# Altium integrated library smoke_detector.IntLib: 17 symbols
Pins are listed as number, name and electrical type; pins without a type are passive.

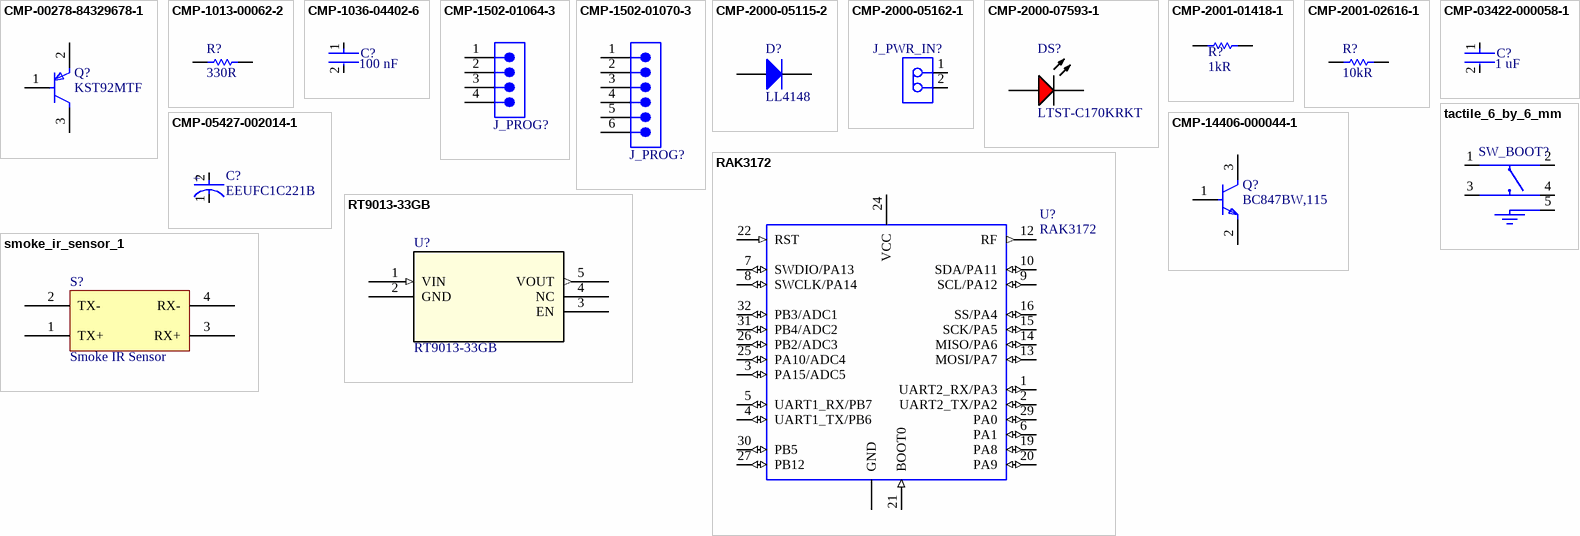
[diagram p0: symbols CMP-00278-84329678-1 to tactile_6_by_6_mm]

## CMP-00278-84329678-1
designator Q?, comment KST92MTF
KST92MTF Trans Gp Bjt PNP 300V 0.5A 250MW 3-PIN SOT-23 T/r / Trans PNP 300V 0.5A SOT23; Manufacturer Lifecycle Status: OBSOLETE; NexarPartId: 84329678; Max Collector Current: -500mA; hFE Min: 25; Power Dissipation: 350mW; Max Frequency: 50MHz; Current: 5A; Voltage: 200V; Collector Emitter Saturation Voltage: -500mV; Collector Emitter Voltage (VCEO): -300V; Emitter Base Voltage (VEBO): -5V; Element Configuration: Single; Max Junction Temperature (Tj): 150°C; Number of Elements: 1; Number of Pins: 3; Max Breakdown Voltage: 300V; Length: 2.9mm; Lead Free: Lead Free; RoHS: Compliant; Radiation Hardening: No; Current Rating: -500mA; Min Operating Temperature: -55°C; Max Operating Temperature: 150°C; Gain Bandwidth Product: 50MHz; Max Power Dissipation: 250mW; Width: 1.3mm; Schedule B: 8541210080; Mount: Surface Mount; Voltage Rating (DC): -300V; Collector Emitter Breakdown Voltage: -300V; Weight: 59.987591mg; REACH SVHC: No SVHC; Polarity: PNP; Lifecycle Status: Obsolete; Case/Package: SOT-23; Collector Base Voltage (VCBO): -300V; Frequency: 50MHz; Packaging: Cut Tape; Height: 1.2mm; Transition Frequency: 50MHz
footprint FP-318BM-MFG (Tape & Reel (TR) Surface Mount NPN SINGLE Bipolar (BJT) Transistor 40 @ 10mA 1V 200mA 225mW 500MHz)
footprint FP-318BM-IPC_A (Tape & Reel (TR) Surface Mount NPN SINGLE Bipolar (BJT) Transistor 40 @ 10mA 1V 200mA 225mW 500MHz)
footprint FP-318BM-IPC_B (Tape & Reel (TR) Surface Mount NPN SINGLE Bipolar (BJT) Transistor 40 @ 10mA 1V 200mA 225mW 500MHz)
footprint FP-318BM-IPC_C (Tape & Reel (TR) Surface Mount NPN SINGLE Bipolar (BJT) Transistor 40 @ 10mA 1V 200mA 225mW 500MHz)
pins: 1 B, 2 E, 3 C

## CMP-1013-00062-2
designator R?, comment value 330R  (hidden comment: ERJ-6GEYJ331V)
Manufacturer: Panasonic; Part Number: ERJ-6GEYJ331V
footprint RESC2013X70X40ML20T20 (Chip Resistor, 2-Leads, Body 2.00x1.25mm, IPC Low Density)
footprint RESC2013X70X40LL20T20 (Chip Resistor, 2-Leads, Body 2.00x1.25mm, IPC High Density)
footprint RESC2013X70X40NL20T20 (Chip Resistor, 2-Leads, Body 2.00x1.25mm, IPC Medium Density)
pins: 1, 2
1 alternate drawing of the same symbol

## CMP-1036-04402-6
designator C?, comment value 100 nF  (hidden comment: CC0805KRX7R7BB104)
CAP CER 0.1UF 16V X7R 0805; Manufacturer: Yageo; Material: Ceramic; Tolerance: 0.1; Manufacturer Part Number: CC0805KRX7R7BB104; Temperature: -30°C to +85°C; Lead Free: Yes; Footprint Url: http://www.yageo.com/exep/pages/download/literatures/UPY-C_GEN_24.pdf; Voltage Rating: 16 V; Package: CC0805-0.85; RoHS: TRUE; Digikey Description: CAP CER 0.1UF 16V X7R 0805; Category: Cap; Octopart: https://octopart.com/cc0805krx7r7bb104-yageo-39467769; Capacitance: 100 nF; Device Class L3: Ceramic Capacitors; ComponentLink2URL: http://www.yageo.com/documents/recent/UPY-GPHC_Y5V_6.3V-to-50V_8.pdf; Temperature Range Low: -30°C; Mouser Description: Multilayer Ceramic Capacitors MLCC - SMD/SMT 100nF 16V X7R 10%; Automotive: No; Device Class L2: Capacitors; Height: 0.95mm; ComponentLink2Description: Datasheet; Temperature Characteristic: X7R; Ipc Land Pattern Name: CAPC200125X85; Device Class L1: Passive Components; Temperature Range High: +85°C
footprint FP-CC0805-0_85-MFG
footprint FP-CC0805-0_85-IPC_C
footprint FP-CC0805-0_85-IPC_B
footprint FP-CC0805-0_85-IPC_A
pins: 1, 2

## CMP-1502-01064-3
designator J_PROG?, comment 61300411121  (value not drawn)
NexarPartId: 32855522; Operating Supply Voltage: 250V; Pitch: 2.54mm; Contact Resistance: 20mΩ; Number of Positions: 4; Current Rating: 3A; Connector Type: Male Pin; Gender: Male; Contact Plating: Gold; Height: 8.89mm; Lead Pitch: 2.54mm; Lead Free: Lead Free; Contact Mating Length: 5.9944mm; Number of Rows: 1; Termination: Solder; Packaging: Bulk; REACH SVHC: Unknown; Min Operating Temperature: -40°C; RoHS: Compliant; Number of Contacts: 4; Voltage Rating: 250V; Color: Black; Max Operating Temperature: 105°C; Contact Material: Copper; Mount: Through Hole; Orientation: Vertical; Number of Pins: 4
footprint 61300411121 (THT Vertical Pin Header WR-PHD, Pitch 2.54 mm, Single Row, 4 pins)
pins: 1, 2, 3, 4

## CMP-1502-01070-3
designator J_PROG?, comment 61300611121  (value not drawn)
NexarPartId: 20084590; Current Rating: 3A; Pitch: 2.54mm; Gender: Male; Operating Supply Voltage: 250V; Connector Type: Male Pin; Number of Positions: 6; Contact Resistance: 20mΩ; Packaging: Bulk; Number of Pins: 6; Number of Rows: 1; Contact Plating: Gold; Lead Free: Lead Free; RoHS: Compliant; Contact Mating Length: 5.9944mm; Voltage Rating: 250V; REACH SVHC: Unknown; Contact Gender: Male; Housing Material: PBT; Min Operating Temperature: -40°C; Lead Pitch: 2.54mm; Mount: Through Hole; Number of Contacts: 6; Max Operating Temperature: 105°C; Contact Material: Copper; Orientation: Vertical; Termination: Through Hole; Color: Black; Height: 8.89mm
footprint 61300611121 (THT Vertical Pin Header WR-PHD, Pitch 2.54 mm, Single Row, 6 pins)
pins: 1, 2, 3, 4, 5, 6

## CMP-2000-05115-2
designator D?, comment LL4148
Small Signal Diode, 100 V, 0.2 A, -55 to 175 degC, 2-Pin SOD80, RoHS, Tape and Reel; Manufacturer: Fairchild; Reverse Voltage-Max [Vrrm]: 100V; Average Forward Current-Max: 200mA; Forward Voltage: 1V; Reverse Recovery Time-Max: 1ns; Power Dissipation: 500mW; Datasheet URL: https://www.fairchildsemi.com/datasheets/LL/LL4148.pdf; Manufacturer URL: https://www.fairchildsemi.com/; Datasheet Version: Rev. 1.8, 01/2016
footprint FAIR-SOD80-2_V (SOD, 2-Leads, Body 3.45x1.4mm)
pins: 1 A, 2 K

## CMP-2000-05162-1
designator J_PWR_IN?, comment B2B-PH-K-S(LF)(SN)  (value not drawn)
Male Header, Pitch 2 mm, 1 x 2 Position, Height 6 mm, Tail Length 3.4 mm, -25 to 85 degC, RoHS, Bulk; Manufacturer: JST; Pitch: 2mm; Style/Orientation: StraightHeader/Plug; No of Positions: 2; Datasheet Version: Nov-08; Datasheet URL: http://datasheet.octopart.com/B2B-PH-K-S%28LF%29%28SN%29-JST-datasheet-8324864.pdf; Manufacturer URL: http://www.jst.com/home2.html; Type: ShroudedHeader; Termination: Crimp
footprint JST-B2B-PH-K-S_V (Connector, 2-Leads, Body 5.9x4.5mm, Pitch 2mm)
pins: 1, 2

## CMP-2000-07593-1
designator DS?, comment LTST-C170KRKT
LED Red, 75 mW, 54 mcd, -55 to 85 degC, 2-Pin SMD, RoHS, Tape and Reel; Manufacturer: Lite-On; Lens Transparency: Clear; Number of Elements: 1; Power Rating: 75mW; Luminous Intensity: 54mcd; Viewing Angle: 130degrees; Forward Current: 30mA; Wavelength: 639nm; Lens Style: Rectangular; Case\/Package: 0805; Test Current: 20mA; Dominant Wavelength: 631nm; Forward Voltage: 2V; Lens Colour: Colorless; Min Operating Temperature: -55degC; RoHSCompliant: True; Length: 3.2mm; Width: 1.25mm; Mount: SurfaceMount; Packaging: TapeandReel; Number of LEDs: 1; Radiation Hardening: No; Datasheet URL: http://optoelectronics.liteon.com/upload/download/DS-22-99-0150/LTST-C170KRKT.pdf; Datasheet Version: Rev. D, 11/2014; Case Code (Metric): 2012; Height: 1.1mm; Number of Pins: 2; Package Description: 2-Pin Surface Mount Device, Body 2 x 1.25 mm; Manufacturer URL: http://www.us.liteon.com/; Lead Free: LeadFree; Illumination Colour: Red; Colour: Red; Case Code (Imperial): 0805; Max Operating Temperature: 85degC; Power Dissipation: 75mW; Mounting Technology: SurfaceMount; Package Reference: C170KRKT; Package Quantity: 1; Depth: 1.6mm
footprint LTST-C170KRKT_V (SMD, 2-Leads, Body 2x1.25mm)
pins: 1 A, 2 K

## CMP-2001-01418-1
designator R?, comment value 1kR  (hidden comment: RC0805JR-131KL)
Manufacturer: Yageo; Part Number: RC0805JR-131KL
footprint RESC2013X60X35LL10T20 (Chip Resistor, 2-Leads, Body 2.00x1.25mm, IPC High Density)
footprint RESC2013X60X35ML10T20 (Chip Resistor, 2-Leads, Body 2.00x1.25mm, IPC Low Density)
footprint RESC2013X60X35NL10T20 (Chip Resistor, 2-Leads, Body 2.00x1.25mm, IPC Medium Density)
pins: 1, 2
1 alternate drawing of the same symbol

## CMP-2001-02616-1
designator R?, comment value 10kR  (hidden comment: SG73S2ATTD1002F)
Manufacturer: KOA Speer; Part Number: SG73S2ATTD1002F
footprint RESC2013X60X30LL20T20 (Chip Resistor, 2-Leads, Body 2.00x1.25mm, IPC High Density)
footprint RESC2013X60X30NL20T20 (Chip Resistor, 2-Leads, Body 2.00x1.25mm, IPC Medium Density)
footprint RESC2013X60X30ML20T20 (Chip Resistor, 2-Leads, Body 2.00x1.25mm, IPC Low Density)
pins: 1, 2
1 alternate drawing of the same symbol

## CMP-03422-000058-1
designator C?, comment value 1 uF  (hidden comment: CC0805KFX7R7BB105)
CC0805 1 uF X7R 10.00% 16 V; Manufacturer: Yageo; Material: Ceramic; Tolerance: 0.1; Voltage Rating: 16 V; ComponentLink2URL: http://www.yageo.com/documents/recent/UPY-GPHC_Y5V_6.3V-to-50V_8.pdf; Capacitance: 1 uF; Octopart: https://octopart.com/cc0805kfx7r7bb105-yageo-30261725; Footprint Url: http://www.yageo.com/exep/pages/download/literatures/UPY-C_GEN_24.pdf; ComponentLink2Description: Datasheet; Ipc Land Pattern Name: CAPC200125X85; Category: Cap; Device Class L1: Passive Components; Temperature Range High: +85°C; Mouser Description: Multilayer Ceramic Capacitors MLCC - SMD/SMT 1.0uF 16V X7R 10%; Height: 0.95mm; Automotive: No; Device Class L3: Ceramic Capacitors; Temperature: -30°C to +85°C; Temperature Range Low: -30°C; Temperature Characteristic: X7R; Device Class L2: Capacitors; Lead Free: Yes; Manufacturer Part Number: CC0805KFX7R7BB105; RoHS: TRUE; Package: CC0805-0.85
footprint FP-CC0805-0_85-MFG
footprint FP-CC0805-0_85-IPC_C
footprint FP-CC0805-0_85-IPC_B
footprint FP-CC0805-0_85-IPC_A
pins: 1, 2

## CMP-05427-002014-1
designator C?, comment EEUFC1C221B
Aluminum Electrolytic Capacitors (Radial Lead Type) AEC-Q200 Qualified 220uF ±20% 16V; Polarity: Polar; Life (Hours): 2000Hour; Ripple Current: 555mA; Impedance: 117mR; Lead Diameter: 0.6mm; Package Quantity: 1000; Lead Pitch: 5mm; Radiation Hardening: No; Mount: Through Hole; Voltage Rating: 16V; RoHS Compliant: Yes; Diameter: 8mm; Length: 11mm; Max Operating Temperature: 105°C; Termination: Radial; Height: 11.5mm; Capacitance: 220uF; Ratings: AEC-Q200; Packaging: Ammo Pack; Height - Seated (Max): 0.492inch; Voltage Rating (DC): 16V; Min Operating Temperature: -55°C; Series: FC; Tolerance: 20%; Case/Package: Radial
footprint FP-RAD-TH-D_8_0_5-L_11_5-MFG
pins: 1 C, 2 A
text: +

## CMP-14406-000044-1
designator Q?, comment BC847BW,115
TRANS NPN 45V 100MA SOT323; RoHS Compliant: Yes
footprint FP-SOT323-MFG
footprint FP-SOT323-IPC_C
footprint FP-SOT323-IPC_B
footprint FP-SOT323-IPC_A
pins: 1 B, 2 E, 3 C

## RAK3172
designator U?
RAK3172 is a low-power long-range transceiver module based on the STM32WLE5CC chip. It provides an easy-to-use, small-size, low-power solution for long range wireless data applications; MF: Shenzhen RAKwireless Technology Co.,Ltd.; MP: RAK3172; Value: *; Check_prices: https://www.snapeda.com/parts/RAK3172/Shenzhen+RAKwireless+Technology+Co.%252CLtd./view-part/?ref=eda; Package: Package; Price: None; Availability: Not in stock; SnapEDA_Link: https://www.snapeda.com/parts/RAK3172/Shenzhen+RAKwireless+Technology+Co.%252CLtd./view-part/?ref=snap
footprint RAK3172
pins: 1 UART2_RX/PA3 (io), 2 UART2_TX/PA2 (io), 3 PA15/ADC5 (io), 4 UART1_TX/PB6 (io), 5 UART1_RX/PB7 (io), 6 PA1 (io), 7 SWDIO/PA13 (io), 8 SWCLK/PA14 (io), 9 SCL/PA12 (io), 10 SDA/PA11 (io), 11 GND (power), 12 RF (out), 13 MOSI/PA7 (io), 14 MISO/PA6 (io), 15 SCK/PA5 (io), 16 SS/PA4 (io), 17 GND (power), 18 GND (power), 19 PA8 (io), 20 PA9 (io), 21 BOOT0 (in), 22 RST (in), 23 GND (power), 24 VCC (power), 25 PA10/ADC4 (io), 26 PB2/ADC3 (io), 27 PB12 (io), 28 GND (power), 29 PA0 (io), 30 PB5 (io), 31 PB4/ADC2 (io), 32 PB3/ADC1 (io)

## RT9013-33GB
designator U?
No Description Available; Manufacturer_Name: Richtek Technology; Copyright: Copyright (C) 2025 Ultra Librarian. All rights reserved.; Manufacturer_Part_Number: RT9013-33GB; RefDes: RefDes; Type: Type
footprint SOT-23-5_RIT
pins: 1 VIN (in), 2 GND (power), 3 EN, 4 NC, 5 VOUT (out)

## smoke_ir_sensor_1
designator S?, comment Smoke IR Sensor
footprint smoke_ir_sensor_1
pins: 1 TX+, 2 TX-, 3 RX+, 4 RX-

## tactile_6_by_6_mm
designator SW_BOOT?  (value not drawn)
footprint tactile_6_by_6_mm
pins: 1, 2, 3, 4, 5